# Altium schematic symbol library 220uF SMD electrolyte.SchLib: 1 symbol
Pins are listed as number, name and electrical type; pins without a type are passive.

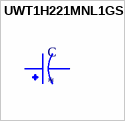
[diagram p0: symbol UWT1H221MNL1GS]

## UWT1H221MNL1GS
designator C
220ÂµF 50V Aluminum Electrolytic Capacitors Radial, Can - SMD 1000 Hrs @ 105Â°C; MF: Nichicon; MP: UWT1H221MNL1GS; Package: Radial Nichicon; Price: None; Availability: Unavailable; SnapEDA_Link: https://www.snapeda.com/parts/UWT1H221MNL1GS/Nichicon/view-part/566503/?ref=snap; Value: *
footprint CAPAE1030X1080N_UWT1H221MNL1GS
pins: 1, 2